# Altium footprint library custom-case.PcbLib: 483 footprints (part 19 of 31)
Each footprint in its own frame and in the unit in brackets; x right, y up, seen from the top. Pads: shape width x height; smd on the part's side, far side on the other; paste and mask are expansions set on the pad; w line width, h text height; cw(c..) or ccw(c..) is an arc to the next point about the centre after c.
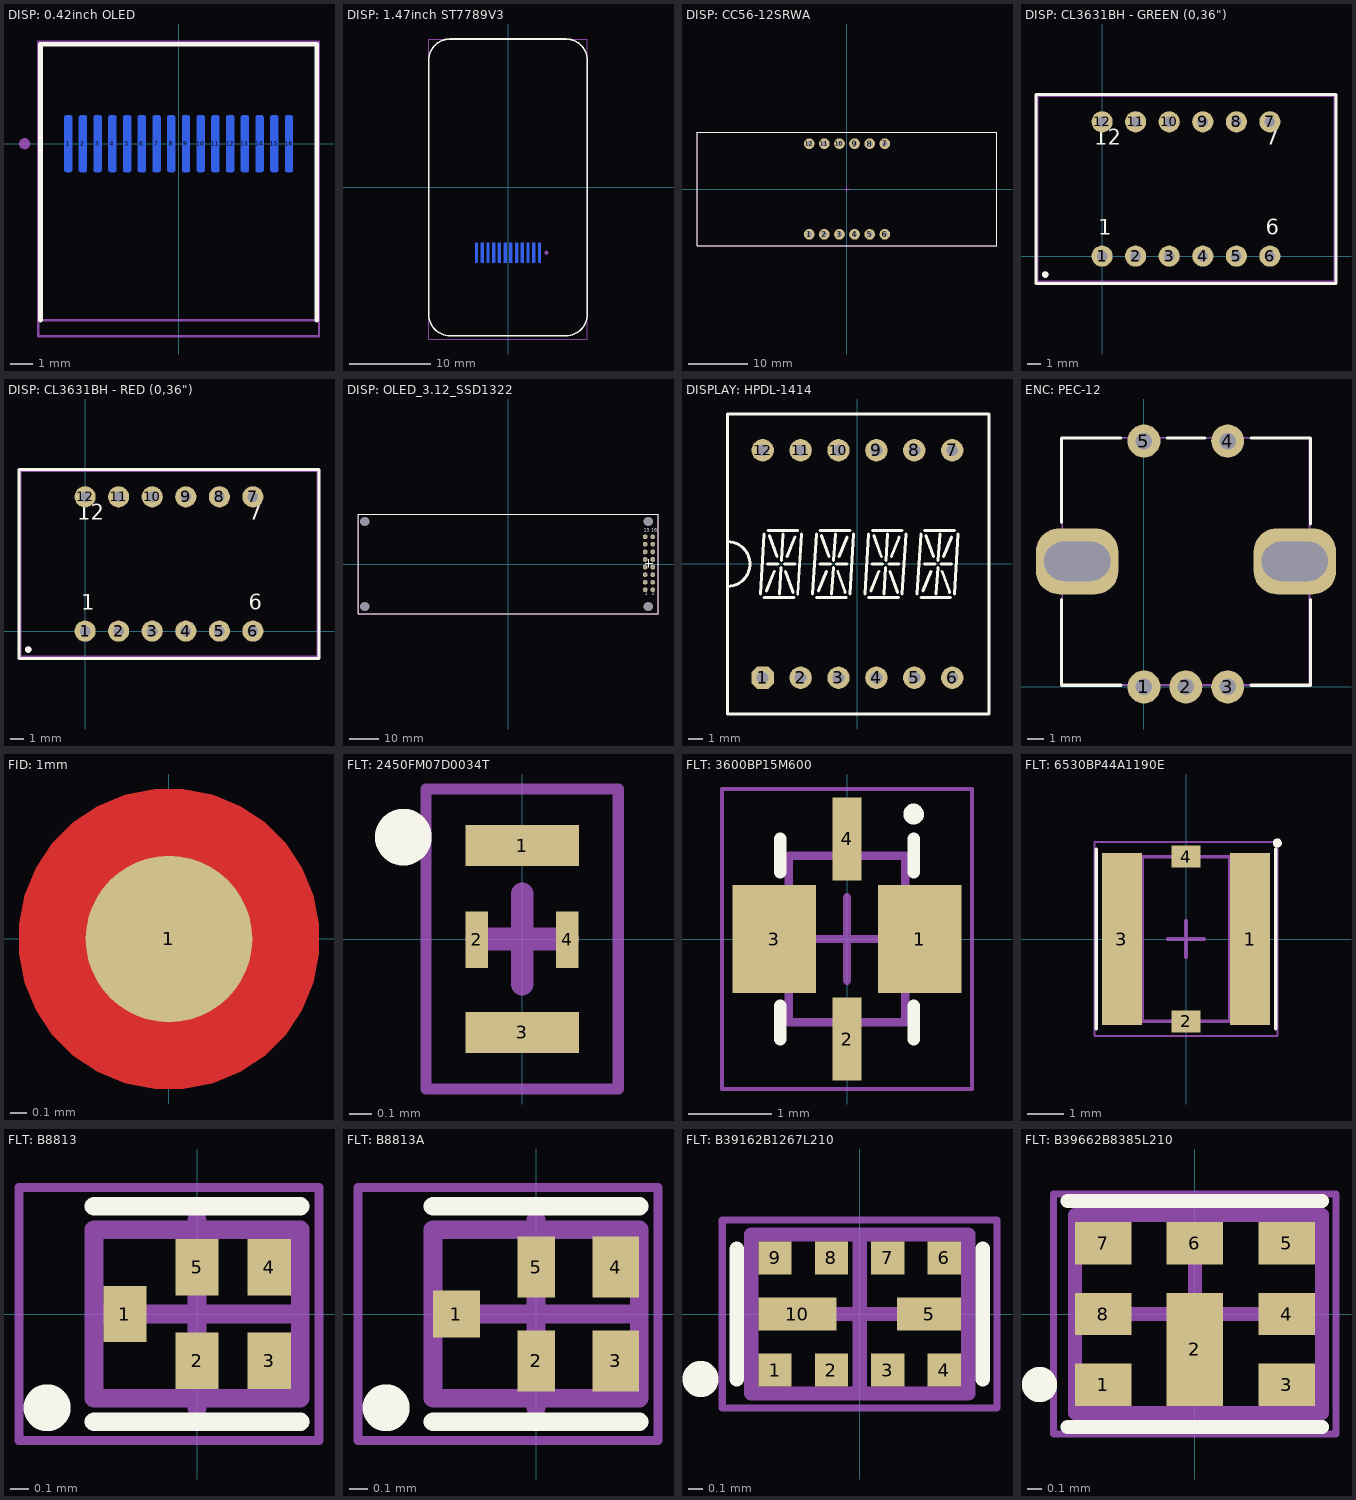
[diagram p18: the footprints below, top view; thin cyan lines are the x and y axes]

## DISP: 0.42inch OLED [mm]
pads (18):
  rrect50% 0.35x2.5 smd far side mask+0.102: 1(-4.875,0) 2(-4.225,0) 3(-3.575,0) 4(-2.925,0) 5(-2.275,0) 6(-1.625,0) 7(-0.975,0) 8(-0.325,0) 9(0.325,0) 10(0.975,0) 11(1.625,0) 12(2.275,0) 13(2.925,0) 14(3.575,0) 15(4.225,0) 16(4.875,0)
  round 0.5 on Mech1: ""(-6.8,0)
  round 0.5 on Bottom Overlay: ""(-6.8,0)
Top Overlay:
  lines w0.2: -6.1,-7.8 -6.1,4.4 6.1,4.4 6.1,-7.8
Bottom Overlay:
  text "1" at -6,-0.542 h1.5
  text "16" at 5.6,-0.542 h1.5
Top Assy:
  lines w0.1: -6.1,-7.8 6.1,-7.8 6.1,4.4 -6.1,4.4 -6.1,-7.8
Size Area:
  lines w0.1: -6.2,-8.5 -6.2,4.5 6.2,4.5 6.2,-8.5 -6.2,-8.5
3D body "OLED_042_1mmPCB.STEP": height 1.15, standoff -1.2, extent -6,-7.75 6,4.3

## DISP: 1.47inch ST7789V3 [mm]
pads (14):
  rrect50% 0.35x2.5 smd far side mask+0.102: 1(3.85,-8) 2(3.15,-8) 3(2.45,-8) 4(1.75,-8) 5(1.05,-8) 6(0.35,-8) 7(-0.35,-8) 8(-1.05,-8) 9(-1.75,-8) 10(-2.45,-8) 11(-3.15,-8) 12(-3.85,-8)
  round 0.5 on Mech1: ""(4.7,-8)
  round 0.5 on Bottom Overlay: ""(4.7,-8)
Top Overlay:
  lines w0.2: -9.7,-15.55 ccw(c-7.1,-15.55) -7.1,-18.15 7.1,-18.15 ccw(c7.1,-15.55) 9.7,-15.55 9.7,15.55 ccw(c7.1,15.55) 7.1,18.15 -7.1,18.15 ccw(c-7.1,15.55) -9.7,15.55 -9.7,-15.55
Bottom Overlay:
  text "12" at -6,-8.542 h1.5
  text "1" at 5.5,-8.542 h1.5
Top Assy:
  lines w0.1: -9.7,-18.55 9.7,-18.55 9.7,18.15 -9.7,18.15 -9.7,-18.55
Size Area:
  lines w0.1: -9.7,-18.55 -9.7,18.15 9.7,18.15 9.7,-18.55 -9.7,-18.55
3D body "IPS_1_47.STEP": height 1.5, standoff -0.91, extent -9.695,-18.54 9.695,18.14

## DISP: CC56-12SRWA [mm]
height 8.1
pads (12):
  round 1.8 hole 0.9: 1(-6.35,-7.62) 2(-3.81,-7.62) 3(-1.27,-7.62) 4(1.27,-7.62) 5(3.81,-7.62) 6(6.35,-7.62) 7(6.35,7.62) 8(3.81,7.62) 9(1.27,7.62) 10(-1.27,7.62) 11(-3.81,7.62) 12(-6.35,7.62)
Top Overlay:
  lines w0.2: -25.2,-9.5 -25.2,9.5 25.2,9.5 25.2,-9.5 -25.2,-9.5
Top Assy:
  lines w0.1: -25.2,-9.5 -25.2,9.5 25.2,9.5 25.2,-9.5 -25.2,-9.5
Size Area:
  lines w0.1: -0.5,0 0.5,0 ; 0,-0.5 0,0.5 ; -25.2,-9.5 25.2,-9.5 25.2,9.5 -25.2,9.5 -25.2,-9.5
3D body "User Library-C-564 (7 segment 4 digit LED display).STEP": height 8, standoff -6.2, extent -25.2,-9.5 25.2,9.5

## DISP: CL3631BH - GREEN (0,36") [mm]
pads (14):
  round 1.6 hole 0.8: 1(0,0) 2(2.54,0) 3(5.08,0) 4(7.62,0) 5(10.16,0) 6(12.7,0) 7(12.7,10.16) 8(10.16,10.16) 9(7.62,10.16) 10(5.08,10.16) 11(2.54,10.16) 12(0,10.16)
  round 0.5 on Mech1: ""(-4.3,-1.4)
  round 0.5 on Top Overlay: ""(-4.3,-1.4)
Top Overlay:
  lines w0.2: -5,-2.075 -5,12.225 17.7,12.225 17.7,-2.075 -5,-2.075
  text "1" at -0.3,1.2 h2
  text "6" at 12.4,1.2 h2
  text "7" at 12.4,8 h2
  text "12" at -0.6,8 h2
Top Assy:
  lines w0.1: -4.85,-1.92 -4.85,12.08 17.55,12.08 17.55,-1.92 -4.85,-1.92
Size Area:
  lines w0.1: -4.95,-2.025 -4.95,12.175 17.65,12.175 17.65,-2.025 -4.95,-2.025
3D body "User Library-3631_Green_jam.STEP": height 7.1, standoff -5.5, extent -4.85,-1.92 17.55,12.08

## DISP: CL3631BH - RED (0,36") [mm]
pads (14):
  round 1.6 hole 0.8: 1(0,0) 2(2.54,0) 3(5.08,0) 4(7.62,0) 5(10.16,0) 6(12.7,0) 7(12.7,10.16) 8(10.16,10.16) 9(7.62,10.16) 10(5.08,10.16) 11(2.54,10.16) 12(0,10.16)
  round 0.5 on Mech1: ""(-4.3,-1.4)
  round 0.5 on Top Overlay: ""(-4.3,-1.4)
Top Overlay:
  lines w0.2: -5,-2.075 17.7,-2.075 17.7,12.225 -5,12.225 -5,-2.075
  text "12" at -0.6,8 h2
  text "7" at 12.4,8 h2
  text "6" at 12.4,1.2 h2
  text "1" at -0.3,1.2 h2
Top Assy:
  lines w0.1: -4.85,-1.92 17.55,-1.92 17.55,12.08 -4.85,12.08 -4.85,-1.92
Size Area:
  lines w0.1: -4.95,-2.025 17.65,-2.025 17.65,12.175 -4.95,12.175 -4.95,-2.025
3D body "User Library-3631_Red_jam.STEP": height 7.1, standoff -5.5, extent -4.85,-1.92 17.55,12.08

## DISP: OLED_3.12_SSD1322 [mm]
pads (20):
  round 1.6 hole 1: 1(45.955,-8.64) 2(48.495,-8.64) 3(45.955,-6.1) 4(48.495,-6.1) 5(45.955,-3.56) 6(48.495,-3.56) 7(45.955,-1.02) 8(48.495,-1.02) 9(45.955,1.52) 10(48.495,1.52) 11(45.955,4.06) 12(48.495,4.06) 13(45.955,6.6) 14(48.495,6.6) 15(45.955,9.14) 16(48.495,9.14)
  round 1.6 hole 3.1 unplated: HOLE(-48,-14.25) HOLE(-48,14.25) HOLE(47,-14.25) HOLE(47,14.25)
Top Overlay:
  lines w0.2: 45.955,0.25 48.495,0.25 ; 47.225,-1.02 47.225,1.52 ; -50.25,-16.75 -50.25,16.75 50.25,16.75 50.25,-16.75 -50.25,-16.75
  text "16" at 47.94,10.3 h2
  text "15" at 45.4,10.3 h2
  text "1" at 45.8,-10.8 h2
  text "2" at 48.2,-10.8 h2
Bottom Overlay:
  text "16" at 49,10.3 h2
  text "15" at 46.4,10.3 h2
  text "2" at 48.7,-10.8 h2
  text "1" at 46.2,-10.8 h2
Top Assy:
  lines w0.1: -50.25,-16.75 50.25,-16.75 50.25,16.75 -50.25,16.75 -50.25,-16.75
Size Area:
  lines w0.1: -50.25,-16.75 -50.25,16.75 50.25,16.75 50.25,-16.75 -50.25,-16.75
3D body "OLED_ASM_01.STEP": height 8.8, standoff -3.6, extent -51.175,-17 50.25,17

## DISPLAY: HPDL-1414 [mm] "HPDL-1414"
height 10
pads (12):
  oct 1.5x1.5 hole 0.8: 1(-6.35,-7.62)
  round 1.5 hole 0.8: 2(-3.81,-7.62) 3(-1.27,-7.62) 4(1.27,-7.62) 5(3.81,-7.62) 6(6.35,-7.62) 7(6.35,7.62) 8(3.81,7.62) 9(1.27,7.62) 10(-1.27,7.62) 11(-3.81,7.62) 12(-6.35,7.62)
Top Overlay:
  lines w0.2: -8.7,-1.5 ccw(c-8.7,0) -8.7,1.5 ; -6.5,-2 -6.25,2 ; -6.25,-2.25 -4.25,-2.25 ; -6.1,-1.8 -5.57,-0.5 ; -6.02,0 -5.32,0 ; -6,2.25 -4,2.25 ; -5.9,1.9 -5.4,0.5 ; -5.23,-2 -5.11,-0.25 ; -5.1,0.25 -4.98,2 ; -4.9,0 -4.2,0 ; -4.82,-0.5 -4.32,-1.9 ; -4.73,0.5 -4.2,1.8 ; -4,-2 -3.75,2 ; -3,-2 -2.75,2 ; -2.75,-2.25 -0.75,-2.25 ; -2.6,-1.8 -2.07,-0.5 ; -2.52,0 -1.82,0 ; -2.5,2.25 -0.5,2.25 ; -2.4,1.9 -1.9,0.5 ; -1.73,-2 -1.61,-0.25 ; -1.6,0.25 -1.48,2 ; -1.4,0 -0.7,0 ; -1.32,-0.5 -0.82,-1.9 ; -1.23,0.5 -0.7,1.8 ; -0.5,-2 -0.25,2 ; 0.5,-2 0.75,2 ; 0.75,-2.25 2.75,-2.25 ; 0.9,-1.8 1.43,-0.5 ; 0.98,0 1.68,0 ; 1,2.25 3,2.25 ; 1.1,1.9 1.6,0.5 ; 1.77,-2 1.89,-0.25 ; 1.9,0.25 2.02,2 ; 2.1,0 2.8,0 ; 2.18,-0.5 2.68,-1.9 ; 2.27,0.5 2.8,1.8 ; 3,-2 3.25,2 ; 4,-2 4.25,2 ; 4.25,-2.25 6.25,-2.25 ; 4.4,-1.8 4.93,-0.5 ; 4.48,0 5.18,0 ; 4.5,2.25 6.5,2.25 ; 4.6,1.9 5.1,0.5 ; 5.27,-2 5.39,-0.25 ; 5.4,0.25 5.52,2 ; 5.6,0 6.3,0 ; 5.68,-0.5 6.18,-1.9 ; 5.77,0.5 6.3,1.8 ; 6.5,-2 6.75,2 ; -8.7,-10.05 -8.7,10.05 8.8,10.05 8.8,-10.05 -8.7,-10.05
Top Assy:
  lines w0.1: -8.7,-10.05 8.8,-10.05 8.8,10.05 -8.7,10.05 -8.7,-10.05
Size Area:
  lines w0.05: -8.7,-10.05 -8.7,10.05 8.8,10.05 8.8,-10.05 -8.7,-10.05
  lines w0.1: 0.77,-7.62 1.77,-7.62 ; 1.27,-8.12 1.27,-7.12
3D body "Indicator_HPDL_1414_02.STEP": height 8.15, standoff -2.35, extent -8.75,-10.06 8.75,10.06

## ENC: PEC-12 [mm]
pads (7):
  round 2 hole 1: 1(0,0) 2(2.54,0) 3(5.08,0) 4(5.08,14.922) 5(0,14.922)
  rrect70% 5x4 hole 2.4 slot 4 at 0 deg: ""(-4.05,7.625) ""(9.15,7.625)
Top Overlay:
  lines w0.2: -5,5.3 -5,0.1 -1.4,0.1 ; -5,10 -5,15.1 -1.4,15.1 ; 1.4,15.1 3.7,15.1 ; 6.5,0.1 10.1,0.1 10.1,5.3 ; 6.5,15.1 10.1,15.1 10.1,9.9
Top Assy:
  lines w0.1: -4.966,0.12 10.046,0.12 10.046,15.12 -4.966,15.12 -4.966,0.12
3D body "User Library-rotacijski enkoder.STEP": height 16.5, standoff -4.53, extent -4.964,0.12 10.044,15.12

## FID: 1mm [mm] "Fiducial 1mm"
height 9
pads (1):
  round 1 smd paste-5 mask+0.2: 1(0,0)
Top Layer:
  pour cut-out: 0,-0.9 -0.089,-0.9 -0.263,-0.865 -0.426,-0.798 -0.574,-0.699 -0.699,-0.574 -0.798,-0.426 -0.865,-0.263 -0.9,-0.089 -0.9,0 -0.9,0.089 -0.865,0.263 -0.798,0.426 -0.699,0.574 -0.574,0.699 -0.426,0.798 -0.263,0.865 -0.089,0.9 0,0.9 0.089,0.9 0.263,0.865 0.426,0.798 0.574,0.699 0.699,0.574 0.798,0.426 0.865,0.263 0.9,0.089 0.9,0 0.9,-0.089 0.865,-0.263 0.798,-0.426 0.699,-0.574 0.574,-0.699 0.426,-0.798 0.263,-0.865 0.089,-0.9

## FLT: 2450FM07D0034T [mm] "Bandpass Filter"
height 12
pads (4):
  rect 0.5x0.18 smd: 1(0,0.413) 3(0,-0.412)
  rect 0.1x0.25 smd: 2(-0.2,-0.003) 4(0.2,-0.003)
Top Overlay:
  circle w0.2: c-0.525,0.45 r0.025
Size Area:
  lines w0.05: -0.425,-0.662 0.425,-0.662 0.425,0.663 -0.425,0.663 -0.425,-0.662
  lines w0.1: -0.2,0 0.2,0 ; 0,-0.2 0,0.2
3D body "2450FM07D0034T.stp": height 0.4, standoff 0, extent -0.253,-0.502 0.253,0.502

## FLT: 3600BP15M600 [mm]
height 12
pads (4):
  rect 1x1.3 smd: 1(0.875,0) 3(-0.875,0)
  rect 0.35x1 smd: 2(0,-1.2) 4(0,1.2)
Top Overlay:
  lines w0.15: -0.8,-1.2 -0.8,-0.8 ; -0.8,0.8 -0.8,1.2 ; 0.8,-1.2 0.8,-0.8 ; 0.8,0.8 0.8,1.2
  lines w0.2: 0.811,1.522 ccw(c0.8,1.5) 0.825,1.5
3D model:
  lines w0.1: -0.7,-1 -0.7,1 0.7,1 0.7,-1 -0.7,-1
Size Area:
  lines w0.05: -1.5,-1.8 -1.5,1.8 1.5,1.8 1.5,-1.8 -1.5,-1.8
  lines w0.1: -0.5,0 0.5,0 ; 0,-0.5 0,0.5
3D body "3600BP15M600.STEP": height 0.98, standoff 0.01, extent -0.635,-1.01 0.635,1.01

## FLT: 6530BP44A1190E [mm]
height 12
pads (4):
  rect 1.1x4.7 smd: 1(1.75,0) 3(-1.75,0)
  rect 0.8x0.6 smd: 2(0,-2.25) 4(0,2.25)
Top Overlay:
  lines w0.1: -2.45,-2.45 -2.45,2.45 ; 2.45,-2.45 2.45,2.45
  lines w0.2: 2.511,2.647 ccw(c2.5,2.625) 2.525,2.625
3D model:
  lines w0.1: -1.2,-2.25 1.2,-2.25 1.2,2.25 -1.2,2.25 -1.2,-2.25
Size Area:
  lines w0.05: -2.5,-2.65 2.5,-2.65 2.5,2.65 -2.5,2.65 -2.5,-2.65
  lines w0.1: -0.5,0 0.5,0 ; 0,-0.5 0,0.5
3D body "6530BP44A1190.STEP": height 2.23, standoff 0.01, extent -1.61,-2.26 1.61,2.26

## FLT: B8813 [mm]
height 12
pads (5):
  rect 0.23x0.3 smd: 1(-0.385,0) 2(0,-0.25) 3(0.385,-0.25) 4(0.385,0.25) 5(0,0.25)
Top Overlay:
  circle w0.2: c-0.8,-0.5 r0.025
  lines w0.1: -0.55,-0.575 0.55,-0.575 ; -0.55,0.575 0.55,0.575
3D model:
  lines w0.1: -0.55,-0.45 -0.55,0.45 0.55,0.45 0.55,-0.45 -0.55,-0.45
Size Area:
  lines w0.05: -0.95,-0.675 -0.95,0.675 0.65,0.675 0.65,-0.675 -0.95,-0.675
  lines w0.1: -0.5,0 0.5,0 ; 0,-0.5 0,0.5
3D body: height 0.45, standoff 0.02, extent -0.55,-0.45 0.55,0.45

## FLT: B8813A [mm] "ABRACON"
height 12
pads (5):
  rect 0.25x0.25 smd: 1(-0.425,0)
  rect 0.2x0.325 smd: 2(0,-0.25) 5(0,0.25)
  rect 0.25x0.325 smd: 3(0.425,-0.25) 4(0.425,0.25)
Top Overlay:
  circle w0.2: c-0.8,-0.5 r0.025
  lines w0.1: -0.55,-0.575 0.55,-0.575 ; -0.55,0.575 0.55,0.575
3D model:
  lines w0.1: -0.55,-0.45 -0.55,0.45 0.55,0.45 0.55,-0.45 -0.55,-0.45
Size Area:
  lines w0.05: -0.95,-0.675 -0.95,0.675 0.65,0.675 0.65,-0.675 -0.95,-0.675
  lines w0.1: -0.5,0 0.5,0 ; 0,-0.5 0,0.5
3D body: height 0.45, standoff 0.02, extent -0.55,-0.45 0.55,0.45

## FLT: B39162B1267L210 [mm]
height 12
pads (10):
  rect 0.23x0.23 smd: 1(-0.585,-0.387) 2(-0.195,-0.387) 3(0.195,-0.387) 4(0.585,-0.387) 6(0.585,0.387) 7(0.195,0.387) 8(-0.195,0.387) 9(-0.585,0.387)
  rect 0.44x0.23 smd: 5(0.48,0)
  rect 0.54x0.23 smd: 10(-0.43,0)
Top Overlay:
  circle w0.2: c-1.1,-0.45 r0.025
  lines w0.1: -0.85,-0.45 -0.85,0.45 ; 0.85,-0.45 0.85,0.45
3D model:
  lines w0.1: -0.75,-0.55 -0.75,0.55 0.75,0.55 0.75,-0.55 -0.75,-0.55
Size Area:
  lines w0.05: -0.95,-0.65 -0.95,0.65 0.95,0.65 0.95,-0.65 -0.95,-0.65
  lines w0.1: -0.5,0 0.5,0 ; 0,-0.5 0,0.5
3D body: height 0.7, standoff 0.02, extent -0.75,-0.55 0.75,0.55

## FLT: B39662B8385L210 [mm]
height 12
pads (8):
  rect 0.4x0.3 smd: 1(-0.65,-0.5) 3(0.65,-0.5) 4(0.65,0) 5(0.65,0.5) 6(0,0.5) 7(-0.65,0.5) 8(-0.65,0)
  rect 0.4x0.8 smd: 2(0,-0.25)
Top Overlay:
  circle w0.2: c-1.1,-0.5 r0.025
  lines w0.1: -0.9,-0.8 0.9,-0.8 ; -0.9,0.8 0.9,0.8
3D model:
  lines w0.1: -0.85,-0.7 -0.85,0.7 0.9,0.7 0.9,-0.7 -0.85,-0.7
Size Area:
  lines w0.05: -1,-0.85 -1,0.85 1,0.85 1,-0.85 -1,-0.85
  lines w0.1: -0.5,0 0.5,0 ; 0,-0.5 0,0.5
3D body: height 0.65, standoff 0.05, extent -0.9,-0.7 0.9,0.7